# Altium integrated library Conectores.IntLib: 55 symbols
Pins are listed as number, name and electrical type; pins without a type are passive.

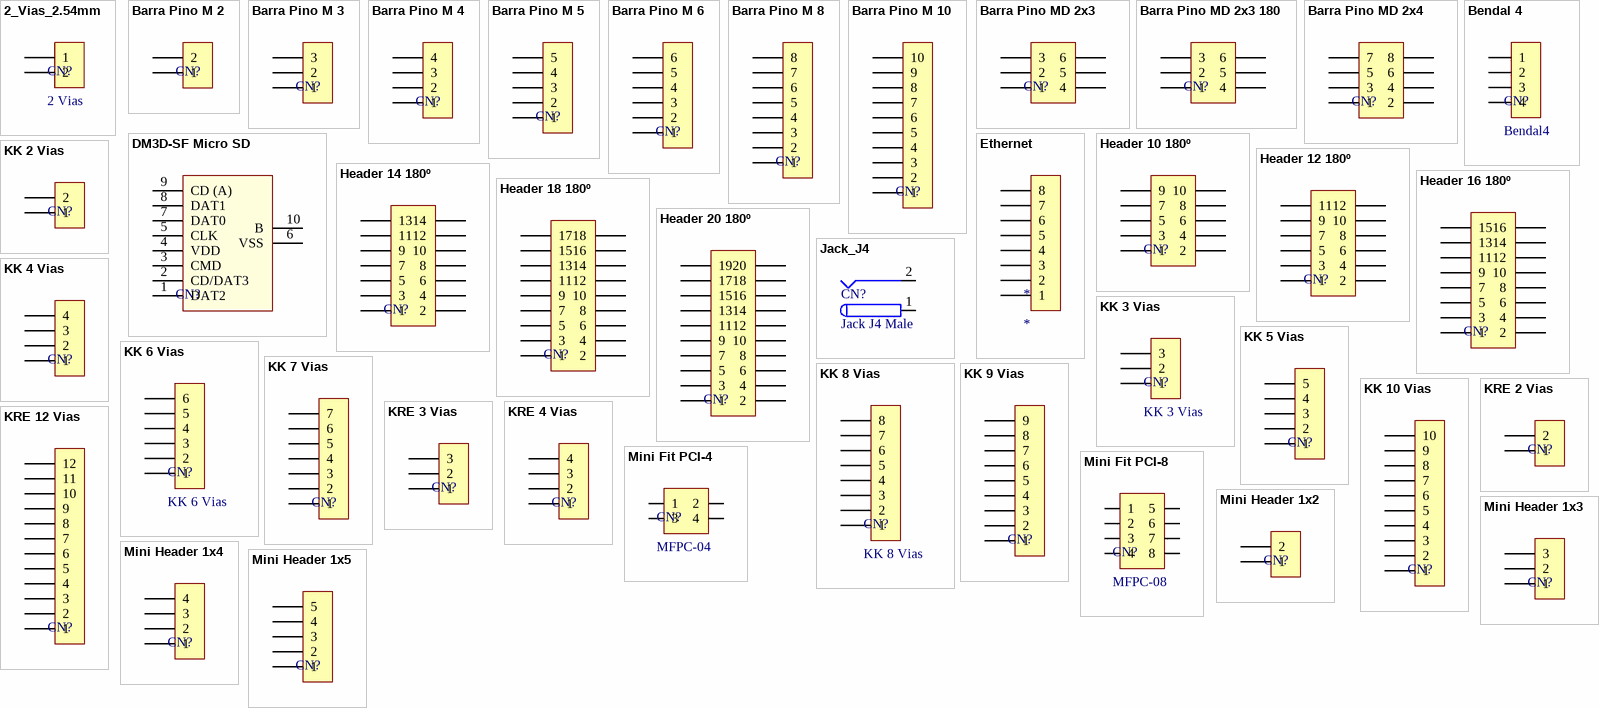
[diagram p0: symbols 2_Vias_2.54mm to Mini Header 1x5]

## 2_Vias_2.54mm
designator CN?, comment 2 Vias
Furos 2.54mm Pitch 1mm
footprint 2_Vias_2.54mm
pins: 1, 2

## Barra Pino M 2
designator CN?, comment Barra Pinos M  (value not drawn)
Barra Pino Macho 2 Vias 2.54mm
footprint Barra Pino M 2 (Barra Pinos Macho 2 Vias 2.54mm)
pins: 1, 2

## Barra Pino M 3
designator CN?, comment Barra Pinos M  (value not drawn)
Barra Pino Macho 3 Vias 2.54mm
footprint Barra Pino M 3 (Barra Pino Macho 3 Vias 2.54mm)
pins: 1, 2, 3

## Barra Pino M 4
designator CN?, comment Barra Pinos M  (value not drawn)
Barra Pino Macho 4 Vias 2.54mm
footprint Barra Pino M 4 (Barra Pinos Macho 4 Vias 2.54mm)
pins: 1, 2, 3, 4

## Barra Pino M 5
designator CN?, comment Barra Pinos M  (value not drawn)
Barra Pino Macho 5 Vias 2.54mm
footprint Barra Pino M 5 (Barra Pino Macho 5 Vias 2.54mm)
pins: 1, 2, 3, 4, 5

## Barra Pino M 6
designator CN?, comment Barra Pinos M  (value not drawn)
Barra Pino Macho 6 Vias 2.54mm
footprint Barra Pino M 6 (Barra Pino Macho 6 Vias 2.54mm)
pins: 1, 2, 3, 4, 5, 6

## Barra Pino M 8
designator CN?, comment Barra Pinos M  (value not drawn)
Barra Pino Macho 8 Vias 2.54mm
footprint Barra Pino M 8 (Barra Pino Macho 8 Vias 2.54mm)
pins: 1, 2, 3, 4, 5, 6, 7, 8

## Barra Pino M 10
designator CN?, comment Barra Pinos M  (value not drawn)
Barra Pino Macho 10 Vias 2.54mm
footprint Barra Pino M 10 (Barra Pino Macho 10 Vias 2.54mm)
pins: 1, 2, 3, 4, 5, 6, 7, 8, 9, 10

## Barra Pino MD 2x3
designator CN?, comment Barra Pinos M 2x3  (value not drawn)
Barra Pino Macho 6 Vias 2.54mm
footprint Barra Pino MD 2x3
pins: 1, 2, 3, 4, 5, 6

## Barra Pino MD 2x3 180
designator CN?, comment Barra Pinos M 2x3  (value not drawn)
Barra Pino Macho 6 Vias 2.54mm
footprint Barra Pino MD 2x3 180 (Barra Pino Macho 3 Vias 2.54mm)
pins: 1, 2, 3, 4, 5, 6

## Barra Pino MD 2x4
designator CN?, comment Barra Pinos M 2x4  (value not drawn)
Barra Pino Macho 8 Vias 2.54mm
footprint Barra Pino MD 2x4 (Barra Pinos Macho 4 Vias 2.54mm)
pins: 1, 2, 3, 4, 5, 6, 7, 8

## Bendal 4
designator CN?, comment Bendal4
Conector Bendal 4 vias 100-304
footprint BENDAL_4 (Conector Bendal 10A 500V 100-304 - 4 Vias)
pins: 1, 2, 3, 4

## DM3D-SF Micro SD
designator CN?, comment DM3D-SF  (value not drawn)
Conector Micro SD Card
footprint DM3D-SF
pins: 1 DAT2, 2 CD/DAT3, 3 CMD, 4 VDD, 5 CLK, 6 VSS, 7 DAT0, 8 DAT1, 9 CD (A), 10 B

## Ethernet
designator *
pins: 1, 2, 3, 4, 5, 6, 7, 8

## Header 10 180º
designator CN?, comment Header 10 Vias  (value not drawn)
Conector Placa Macho 12 Vias C/ guia 180º 2.54mm
footprint Header 10 180º PCI
pins: 1, 2, 3, 4, 5, 6, 7, 8, 9, 10

## Header 12 180º
designator CN?, comment Header 12 Vias  (value not drawn)
Conector Placa Macho 12 Vias C/ guia 180º 2.54mm
footprint Header 12 180º PCI
pins: 1, 2, 3, 4, 5, 6, 7, 8, 9, 10, 11, 12

## Header 14 180º
designator CN?, comment Header 14 Vias  (value not drawn)
Conector Placa Macho 14 Vias C/ guia 180º 2.54mm
footprint Header 14 180º PCI
pins: 1, 2, 3, 4, 5, 6, 7, 8, 9, 10, 11, 12, 13, 14

## Header 16 180º
designator CN?, comment Header 16 Vias  (value not drawn)
Conector Placa Macho 16 Vias C/ guia 180º 2.54mm
footprint Header 16 180º PCI
pins: 1, 2, 3, 4, 5, 6, 7, 8, 9, 10, 11, 12, 13, 14, 15, 16

## Header 18 180º
designator CN?, comment Header 18 Vias  (value not drawn)
Conector Placa Macho 18 Vias C/ guia 180º 2.54mm
footprint Header 18 180º PCI
pins: 1, 2, 3, 4, 5, 6, 7, 8, 9, 10, 11, 12, 13, 14, 15, 16, 17, 18

## Header 20 180º
designator CN?, comment Header 20 Vias  (value not drawn)
Conector Placa Macho 20 Vias C/ guia 180º 2.54mm
footprint Header 20 180º PCI
pins: 1, 2, 3, 4, 5, 6, 7, 8, 9, 10, 11, 12, 13, 14, 15, 16, 17, 18, 19, 20

## Jack_J4
designator CN?, comment Jack J4 Male
Conector Plug Jack J4 (padrao arduino)
footprint Jack J4
pins: 1 (power), 2 (power)

## KK 2 Vias
designator CN?  (value not drawn)
Conector Placa KK 2 Vias 2.54mm
footprint KK_2W_.100
pins: 1, 2

## KK 3 Vias
designator CN?
Conector Placa KK 3 Vias 2.54mm
footprint KK_3W_.100
pins: 1, 2, 3

## KK 4 Vias
designator CN?  (value not drawn)
Conector Placa KK 4 Vias 2.54mm
footprint KK_4W_.100
pins: 1, 2, 3, 4

## KK 5 Vias
designator CN?  (value not drawn)
Conector Placa KK 5 Vias 2.54mm
footprint KK_5W_.100
pins: 1, 2, 3, 4, 5

## KK 6 Vias
designator CN?
Conector Placa KK 6 Vias 2.54mm
footprint KK_6W_.100
pins: 1, 2, 3, 4, 5, 6

## KK 7 Vias
designator CN?  (value not drawn)
Conector Placa KK 7 Vias 2.54mm
footprint KK_7W_.100
pins: 1, 2, 3, 4, 5, 6, 7

## KK 8 Vias
designator CN?
Conector Placa KK 8 Vias 2.54mm
footprint KK_8W_.100
pins: 1, 2, 3, 4, 5, 6, 7, 8

## KK 9 Vias
designator CN?  (value not drawn)
Conector Placa KK 9 Vias 2.54mm
footprint KK_9W_.100
pins: 1, 2, 3, 4, 5, 6, 7, 8, 9

## KK 10 Vias
designator CN?  (value not drawn)
Conector Placa KK 10 Vias 2.54mm
footprint KK_10W_.100
pins: 1, 2, 3, 4, 5, 6, 7, 8, 9, 10

## KRE 2 Vias
designator CN?  (value not drawn)
Conector Placa KRE 2 Vias 5mm
footprint KRE 2 Vias 5mm (Terminal Block 2 Pos. 5.08mm Pitch)
pins: 1, 2

## KRE 3 Vias
designator CN?  (value not drawn)
Conector Placa KRE 3 Vias 5mm
footprint KRE 3 Vias 5mm (Terminal Block 3 Pos. 5mm Pitch)
pins: 1, 2, 3

## KRE 4 Vias
designator CN?  (value not drawn)
Conector Placa KRE 4 Vias 5mm
footprint KRE 4 Vias 5mm (Terminal Block 4 Pos. 5mm Pitch)
pins: 1, 2, 3, 4

## KRE 12 Vias
designator CN?  (value not drawn)
Conector Placa KRE 12 Vias 5mm
footprint KRE 12 Vias 5mm (Terminal Block 12 Pos. 5mm Pitch)
pins: 1, 2, 3, 4, 5, 6, 7, 8, 9, 10, 11, 12

## Mini Fit PCI-4
designator CN?, comment MFPC-04
Conector Macho para PCI 4 vias 4.2mm
footprint MFPC-04
pins: 1, 2, 3, 4

## Mini Fit PCI-8
designator CN?, comment MFPC-08
Conector Macho para PCI 8 vias 4.2mm
footprint MFPC-08
pins: 1, 2, 3, 4, 5, 6, 7, 8

## Mini Header 1x2
designator CN?, comment Mini Header  (value not drawn)
Barra Pino Femea 2 Vias 2.54mm; Partnumber: MCS-02
footprint Mini Header 1x2 (Barra Pinos Femea 2 Vias 2.54mm)
pins: 1, 2

## Mini Header 1x3
designator CN?, comment Mini Header  (value not drawn)
Barra Pino Femea 3 Vias 2.54mm; Partnumber: MCS-03
footprint Mini Header 1x3 (MCS-03)
pins: 1, 2, 3

## Mini Header 1x4
designator CN?, comment Mini Header  (value not drawn)
Barra Pino Femea 4 Vias 2.54mm; Partnumber: MCS-04
footprint Mini Header 1x4 (MCS-04)
pins: 1, 2, 3, 4

## Mini Header 1x5
designator CN?, comment Mini Header  (value not drawn)
Barra Pino Femea 5 Vias 2.54mm; Partnumber: MCS-05
footprint Mini Header 1x5 (MCS-05)
pins: 1, 2, 3, 4, 5

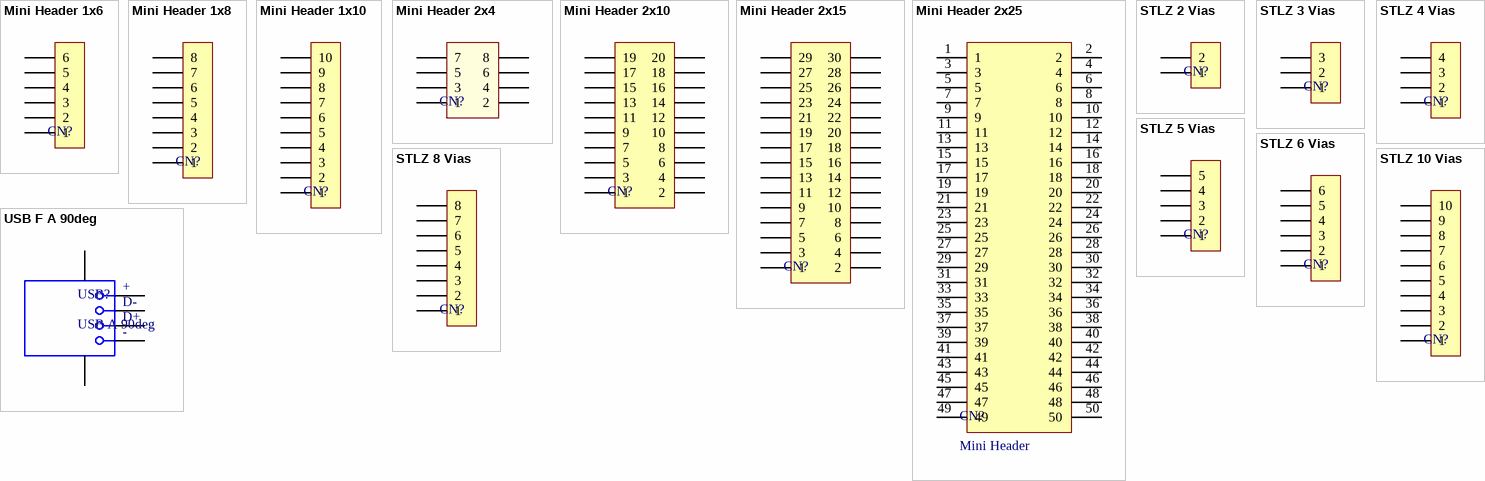
[diagram p1: symbols Mini Header 1x6 to USB F A 90deg]

## Mini Header 1x6
designator CN?, comment Mini Header  (value not drawn)
Barra Pino Femea 6 Vias 2.54mm; Partnumber: MCS-06
footprint Mini Header 1x6 (MCS-06)
pins: 1, 2, 3, 4, 5, 6

## Mini Header 1x8
designator CN?, comment Mini Header  (value not drawn)
Barra Pino Femea 8 Vias 2.54mm; Partnumber: MCS-08
footprint Mini Header 1x8 (MCS-08)
pins: 1, 2, 3, 4, 5, 6, 7, 8

## Mini Header 1x10
designator CN?, comment Mini Header  (value not drawn)
Barra Pino Femea 10 Vias 2.54mm; Partnumber: MCS-10
footprint Mini Header 1x10 (MCS-10)
pins: 1, 2, 3, 4, 5, 6, 7, 8, 9, 10

## Mini Header 2x4
designator CN?, comment Mini Header  (value not drawn)
Barra Pino Femea 2x4 Vias 2.54mm; Partnumber: MCD-04
footprint Mini Header 2x4 (MCD-04)
pins: 1, 2, 3, 4, 5, 6, 7, 8

## Mini Header 2x10
designator CN?, comment Mini Header  (value not drawn)
Barra Pino Femea 2x10 Vias 2.54mm; Partnumber: MCD-10
footprint Mini Header 2x10 (MCD-10)
pins: 1, 2, 3, 4, 5, 6, 7, 8, 9, 10, 11, 12, 13, 14, 15, 16, 17, 18, 19, 20

## Mini Header 2x15
designator CN?, comment Mini Header  (value not drawn)
Barra Pino Femea 2x15 Vias 2.54mm; Partnumber: MCD-15
footprint Mini Header 2x15 (MCD-15)
pins: 1, 2, 3, 4, 5, 6, 7, 8, 9, 10, 11, 12, 13, 14, 15, 16, 17, 18, 19, 20, 21, 22, 23, 24, 25, 26, 27, 28, 29, 30

## Mini Header 2x25
designator CN?, comment Mini Header
Mini Header Femea 2x25 Vias 2.54mm; Partnumber: MCD-25
footprint Mini Header 2X25 (MCD-25)
pins: 1, 2, 3, 4, 5, 6, 7, 8, 9, 10, 11, 12, 13, 14, 15, 16, 17, 18, 19, 20, 21, 22, 23, 24, 25, 26, 27, 28, 29, 30, 31, 32, 33, 34, 35, 36, 37, 38, 39, 40, 41, 42, 43, 44, 45, 46, 47, 48, 49, 50

## STLZ 2 Vias
designator CN?  (value not drawn)
Conector Socket STLZ 2 Vias 5.08mm
footprint STLZ 2 5.08mm (Socket STLZ 2 Pos. 5.08mm Pitch)
pins: 1, 2

## STLZ 3 Vias
designator CN?  (value not drawn)
Conector Socket STLZ 3 Vias 5.08mm
footprint STLZ 3 5.08mm (Socket STLZ 3 Pos. 5.08mm Pitch)
pins: 1, 2, 3

## STLZ 4 Vias
designator CN?  (value not drawn)
Conector Socket STLZ 4 Vias 5.08mm
footprint STLZ 4 5.08mm (Socket STLZ 4 Pos. 5.08mm Pitch)
pins: 1, 2, 3, 4

## STLZ 5 Vias
designator CN?  (value not drawn)
Conector Socket STLZ 5 Vias 5.08mm
footprint STLZ 5 5.08mm (Socket STLZ 5 Pos. 5.08mm Pitch)
pins: 1, 2, 3, 4, 5

## STLZ 6 Vias
designator CN?  (value not drawn)
Conector Socket STLZ 6 Vias 5.08mm
footprint STLZ 6 5.08mm (Socket STLZ 6 Pos. 5.08mm Pitch)
pins: 1, 2, 3, 4, 5, 6

## STLZ 8 Vias
designator CN?  (value not drawn)
Conector Socket STLZ 8 Vias 5.08mm
footprint STLZ 8 5.08mm (Socket STLZ 8 Pos. 5.08mm Pitch)
pins: 1, 2, 3, 4, 5, 6, 7, 8

## STLZ 10 Vias
designator CN?  (value not drawn)
Conector Socket STLZ 10 Vias 5.08mm
footprint STLZ 10 5.08mm (Socket STLZ 10 Pos. 5.08mm Pitch)
pins: 1, 2, 3, 4, 5, 6, 7, 8, 9, 10

## USB F A 90deg
designator USB?, comment USB A 90deg
footprint USB A 90
pins: 1 +, 2 D-, 3 D+, 4 -, 4, 4